# Altium schematic symbol library 0685T1000-01.SchLib: 1 symbol
Pins are listed as number, name and electrical type; pins without a type are passive.

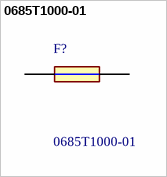
[diagram p0: symbol 0685T1000-01]

## 0685T1000-01
designator F?
BEL FUSE - 0685T1000-01 - FUSE, SMD, 1A, SLOW BLOW, 1206; Geometry.Height: 0.83mm; Manufacturer_Name: BelFuse; Manufacturer_Part_Number: 0685T1000-01; Mouser Part Number: *; Mouser Price/Stock: *; Arrow Part Number: *; Arrow Price/Stock: *; Datasheet Link: https://www.belfuse.com/resources/datasheets/circuitprotection/ds-cp-c1t-series.pdf
footprint FUSC3216X83N
pins: 1, 2